# Altium footprint library FootPrintLib_12.PcbLib: 319 footprints (part 16 of 20)
Each footprint in its own frame and in the unit in brackets; x right, y up, seen from the top. Pads: shape width x height; smd on the part's side, far side on the other; paste and mask are expansions set on the pad; w line width, h text height; cw(c..) or ccw(c..) is an arc to the next point about the centre after c.
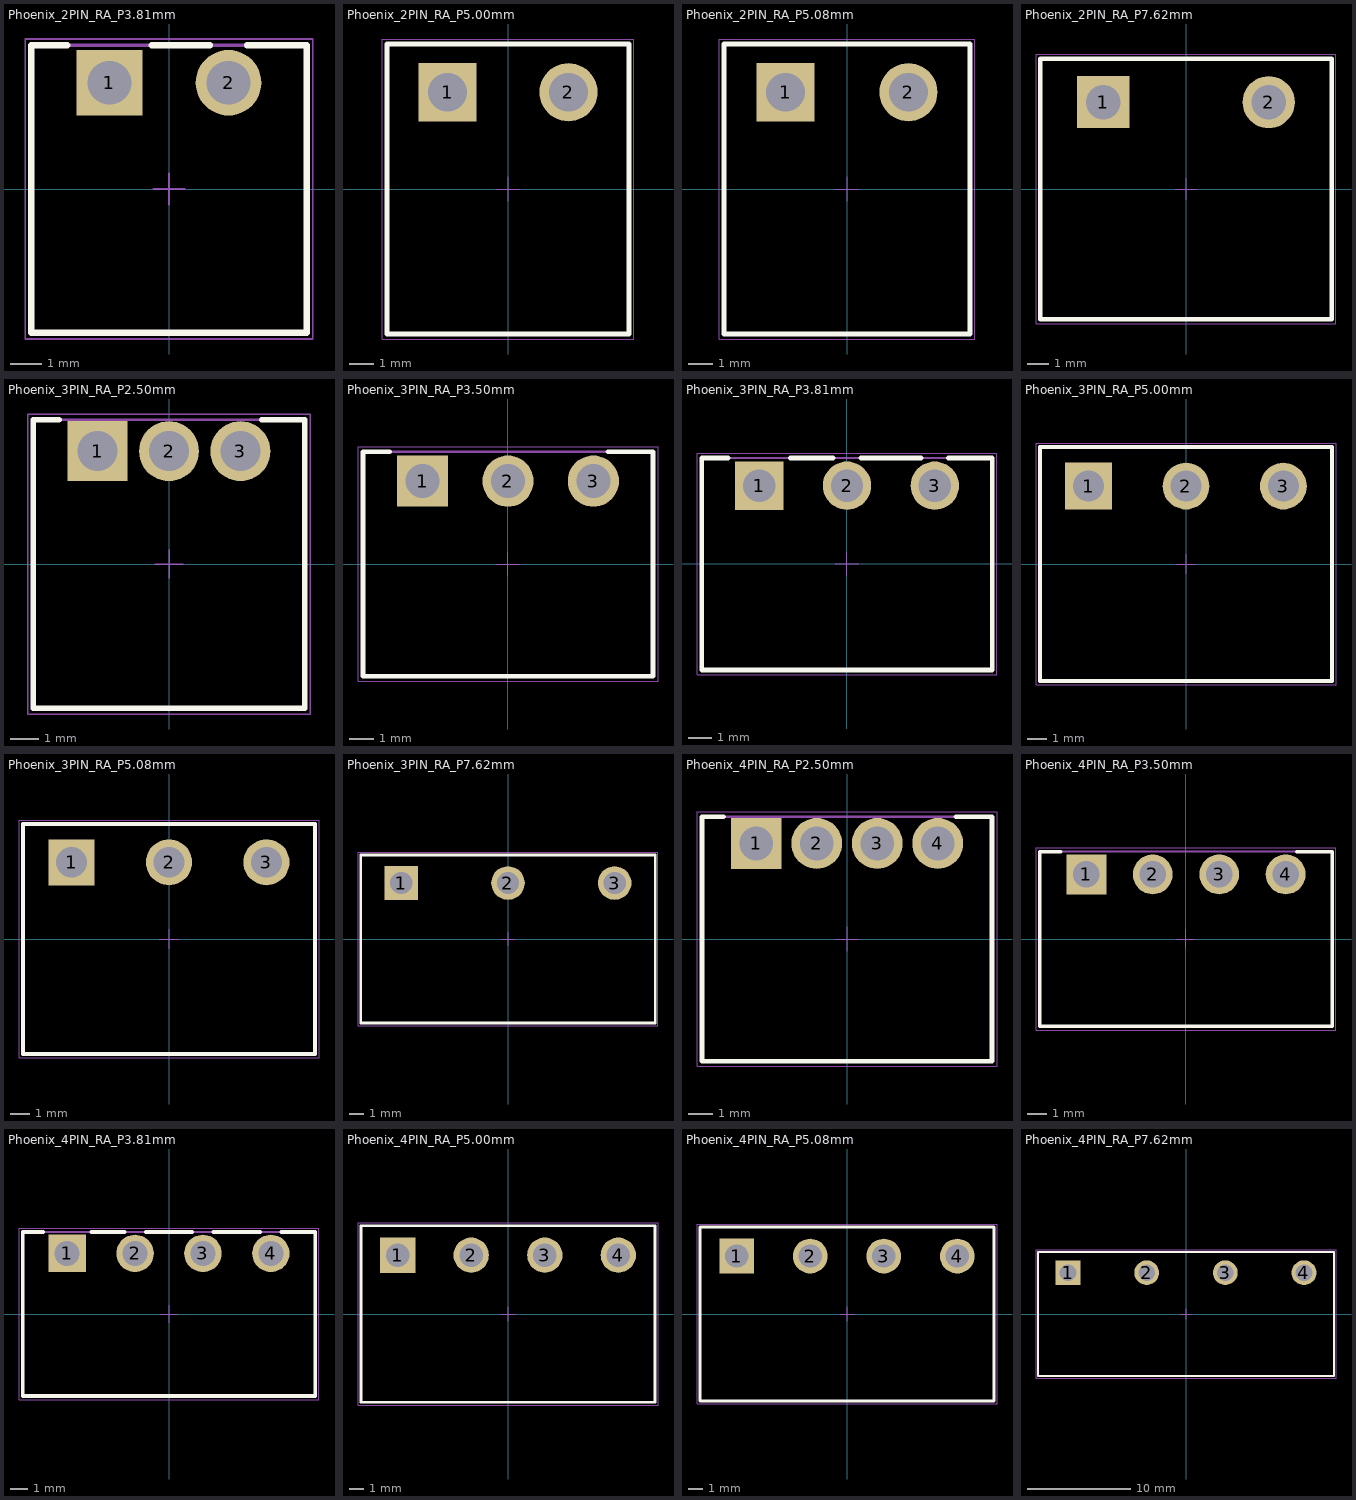
[diagram p15: the footprints below, top view; thin cyan lines are the x and y axes]

## Phoenix_2PIN_RA_P3.81mm [mm] "Phoenix 2 Pin; Pitch 3.81mm;"
height 7
pads (2):
  rect 2.1x2.1 hole 1.4: 1(-1.905,3.4)
  round 2.1 hole 1.4: 2(1.905,3.4)
Top Overlay:
  lines w0.2: -3.255,4.6 -4.405,4.6 -4.405,-4.6 4.405,-4.6 4.405,4.6 2.495,4.6 ; -0.555,4.6 1.315,4.6
Mechanical 13:
  lines w0.1: -4.405,-4.6 -4.405,4.6 4.405,4.6 4.405,-4.6 -4.405,-4.6
Mechanical 15:
  lines w0.05: -0.5,0 0.5,0 ; 0,-0.5 0,0.5 ; -4.605,-4.8 -4.605,4.8 4.605,4.8 4.605,-4.8 -4.605,-4.8
3D body "691322310002.stp": height 7.25, standoff -3.45, extent -4.405,-4.6 4.405,4.6

## Phoenix_2PIN_RA_P5.00mm [mm] "Phoenix 2 Pin; Pitch 5.08mm;"
height 8.5
pads (2):
  rect 2.4x2.4 hole 1.6: 1(-2.5,4)
  round 2.4 hole 1.6: 2(2.5,4)
Top Overlay:
  lines w0.2: -5,-6 5,-6 5,6 -5,6 -5,-6
Mechanical 13:
  lines w0.1: -5,-6 -5,6 5,6 5,-6 -5,-6
Mechanical 15:
  lines w0.05: -0.5,0 0.5,0 ; 0,-0.5 0,0.5 ; -5.2,-6.2 5.2,-6.2 5.2,6.2 -5.2,6.2 -5.2,-6.2
3D body "691312710002.stp": height 8.55, standoff -3.45, extent -5,-6 5,6

## Phoenix_2PIN_RA_P5.08mm [mm] "Phoenix 2 Pin; Pitch 5.08mm; Body 1016X1200"
height 8.5
pads (2):
  rect 2.4x2.4 hole 1.6: 1(-2.54,4)
  round 2.4 hole 1.6: 2(2.54,4)
Top Overlay:
  lines w0.2: -5.08,-6 5.08,-6 5.08,6 -5.08,6 -5.08,-6
Mechanical 13:
  lines w0.1: -5.08,-6 -5.08,6 5.08,6 5.08,-6 -5.08,-6
Mechanical 15:
  lines w0.05: -0.5,0 0.5,0 ; 0,-0.5 0,0.5 ; -5.28,-6.2 5.28,-6.2 5.28,6.2 -5.28,6.2 -5.28,-6.2
3D body "691312510002.stp": height 8.55, standoff -3.45, extent -5.08,-6 5.08,6

## Phoenix_2PIN_RA_P7.62mm [mm] "Phoenix 2 Pin; Pitch 7.62mm;"
height 8.5
pads (2):
  rect 2.4x2.4 hole 1.6: 1(-3.81,4)
  round 2.4 hole 1.6: 2(3.81,4)
Top Overlay:
  lines w0.2: -6.71,-6 6.71,-6 6.71,6 -6.71,6 -6.71,-6
Mechanical 13:
  lines w0.1: -6.71,-6 -6.71,6 6.71,6 6.71,-6 -6.71,-6
Mechanical 15:
  lines w0.05: -0.5,0 0.5,0 ; 0,-0.5 0,0.5 ; -6.91,-6.2 -6.91,6.2 6.91,6.2 6.91,-6.2 -6.91,-6.2
3D body "691312410002.stp": height 8.55, standoff -3.95, extent -6.71,-6 6.71,6

## Phoenix_3PIN_RA_P2.50mm [mm] "Phoenix 3 Pin; Pitch 2.50mm;"
height 8.1
pads (3):
  rect 2.1x2.1 hole 1.4: 1(-2.5,3.95)
  round 2.1 hole 1.4: 2(0,3.95) 3(2.5,3.95)
Top Overlay:
  lines w0.2: -3.85,5.05 -4.75,5.05 -4.75,-5.05 4.75,-5.05 4.75,5.05 3.25,5.05
Mechanical 13:
  lines w0.1: -4.75,-5.05 4.75,-5.05 4.75,5.05 -4.75,5.05 -4.75,-5.05
Mechanical 15:
  lines w0.05: -0.5,0 0.5,0 ; 0,-0.5 0,0.5 ; -4.95,-5.25 4.95,-5.25 4.95,5.25 -4.95,5.25 -4.95,-5.25
3D body "691382010003.stp": height 8.15, standoff -3.45, extent -4.75,-5.05 4.75,5.05

## Phoenix_3PIN_RA_P3.50mm [mm] "Phoenix 2 Pin; Pitch 3.50mm;"
height 7
pads (3):
  rect 2.1x2.1 hole 1.4: 1(-3.5,3.4)
  round 2.1 hole 1.4: 2(0,3.4) 3(3.5,3.4)
Top Overlay:
  lines w0.2: -4.85,4.6 -5.95,4.6 -5.95,-4.6 5.95,-4.6 5.95,4.6 4.1,4.6
Mechanical 13:
  lines w0.1: -5.95,-4.6 -5.95,4.6 5.95,4.6 5.95,-4.6 -5.95,-4.6
Mechanical 15:
  lines w0.05: -0.5,0 0.5,0 ; 0,-0.5 0,0.5 ; -6.15,-4.8 -6.15,4.8 6.15,4.8 6.15,-4.8 -6.15,-4.8
3D body "691322110003.stp": height 7.3, standoff -3.4, extent -5.95,-4.6 5.95,4.6

## Phoenix_3PIN_RA_P3.81mm [mm] "Phoenix 3 Pin; Pitch 3.81mm;"
height 7
pads (3):
  rect 2.1x2.1 hole 1.4: 1(-3.81,3.4)
  round 2.1 hole 1.4: 2(0,3.4) 3(3.81,3.4)
Top Overlay:
  lines w0.2: -5.16,4.6 -6.31,4.6 -6.31,-4.6 6.31,-4.6 6.31,4.6 4.4,4.6 ; -2.46,4.6 -0.59,4.6 ; 0.59,4.6 3.22,4.6
Mechanical 13:
  lines w0.1: -6.31,-4.6 6.31,-4.6 6.31,4.6 -6.31,4.6 -6.31,-4.6
Mechanical 15:
  lines w0.05: -0.5,0 0.5,0 ; 0,-0.5 0,0.5 ; -6.51,-4.8 6.51,-4.8 6.51,4.8 -6.51,4.8 -6.51,-4.8
3D body "691322310003.stp": height 7.25, standoff -3.45, extent -6.31,-4.6 6.31,4.6

## Phoenix_3PIN_RA_P5.00mm [mm] "Phoenix 3 Pin; Pitch 5.08mm;"
height 8.5
pads (3):
  rect 2.4x2.4 hole 1.6: 1(-5,4)
  round 2.4 hole 1.6: 2(0,4) 3(5,4)
Top Overlay:
  lines w0.2: -7.5,-6 7.5,-6 7.5,6 -7.5,6 -7.5,-6
Mechanical 13:
  lines w0.1: -7.5,-6 -7.5,6 7.5,6 7.5,-6 -7.5,-6
Mechanical 15:
  lines w0.05: -0.5,0 0.5,0 ; 0,-0.5 0,0.5 ; -7.7,-6.2 7.7,-6.2 7.7,6.2 -7.7,6.2 -7.7,-6.2
3D body "691312710003.stp": height 8.55, standoff -3.45, extent -7.5,-6 7.5,6

## Phoenix_3PIN_RA_P5.08mm [mm] "Phoenix 3 Pin; Pitch 5.08mm; Body 1524X1200"
height 8.5
pads (3):
  rect 2.4x2.4 hole 1.6: 1(-5.08,4)
  round 2.4 hole 1.6: 2(0,4) 3(5.08,4)
Top Overlay:
  lines w0.2: -7.62,-6 -7.62,6 7.62,6 7.62,-6 -7.62,-6
Mechanical 13:
  lines w0.1: -7.62,-6 7.62,-6 7.62,6 -7.62,6 -7.62,-6
Mechanical 15:
  lines w0.05: -0.5,0 0.5,0 ; 0,-0.5 0,0.5 ; -7.82,-6.2 -7.82,6.2 7.82,6.2 7.82,-6.2 -7.82,-6.2
3D body "691312510003.stp": height 8.55, standoff -3.45, extent -7.62,-6 7.62,6

## Phoenix_3PIN_RA_P7.62mm [mm] "Phoenix 3 Pin; Pitch 7.62mm;"
height 8.5
pads (3):
  rect 2.4x2.4 hole 1.6: 1(-7.62,4)
  round 2.4 hole 1.6: 2(0,4) 3(7.62,4)
Top Overlay:
  lines w0.2: -10.52,-6 10.52,-6 10.52,6 -10.52,6 -10.52,-6
Mechanical 13:
  lines w0.1: -10.52,-6 -10.52,6 10.52,6 10.52,-6 -10.52,-6
Mechanical 15:
  lines w0.05: -0.5,0 0.5,0 ; 0,-0.5 0,0.5 ; -10.72,-6.2 -10.72,6.2 10.72,6.2 10.72,-6.2 -10.72,-6.2
3D body "691312410003.stp": height 8.55, standoff -3.95, extent -10.52,-6 10.52,6

## Phoenix_4PIN_RA_P2.50mm [mm] "Phoenix 4 Pin; Pitch 2.50mm;"
height 8.1
pads (4):
  rect 2.1x2.1 hole 1.4: 1(-3.75,3.95)
  round 2.1 hole 1.4: 2(-1.25,3.95) 3(1.25,3.95) 4(3.75,3.95)
Top Overlay:
  lines w0.2: -5.1,5.05 -6,5.05 -6,-5.05 6,-5.05 6,5.05 4.5,5.05
Mechanical 13:
  lines w0.1: -6,-5.05 -6,5.05 6,5.05 6,-5.05 -6,-5.05
Mechanical 15:
  lines w0.05: -0.5,0 0.5,0 ; 0,-0.5 0,0.5 ; -6.2,-5.25 -6.2,5.25 6.2,5.25 6.2,-5.25 -6.2,-5.25
3D body "691382010004.stp": height 8.15, standoff -3.45, extent -6,-5.05 6,5.05

## Phoenix_4PIN_RA_P3.50mm [mm] "Phoenix 4 Pin; Pitch 3.50mm;"
height 7
pads (4):
  rect 2.1x2.1 hole 1.4: 1(-5.25,3.4)
  round 2.1 hole 1.4: 2(-1.75,3.4) 3(1.75,3.4) 4(5.25,3.4)
Top Overlay:
  lines w0.2: -6.6,4.6 -7.7,4.6 -7.7,-4.6 7.7,-4.6 7.7,4.6 5.85,4.6
Mechanical 13:
  lines w0.1: -7.7,-4.6 -7.7,4.6 7.7,4.6 7.7,-4.6 -7.7,-4.6
Mechanical 15:
  lines w0.05: -0.5,0 0.5,0 ; 0,-0.5 0,0.5 ; -7.9,-4.8 -7.9,4.8 7.9,4.8 7.9,-4.8 -7.9,-4.8
3D body "691322110004.stp": height 7.3, standoff -3.4, extent -7.7,-4.6 7.7,4.6

## Phoenix_4PIN_RA_P3.81mm [mm] "Phoenix 4 Pin; Pitch 3.81mm;"
height 7
pads (4):
  rect 2.1x2.1 hole 1.4: 1(-5.715,3.4)
  round 2.1 hole 1.4: 2(-1.905,3.4) 3(1.905,3.4) 4(5.715,3.4)
Top Overlay:
  lines w0.2: -7.065,4.6 -8.215,4.6 -8.215,-4.6 8.215,-4.6 8.215,4.6 6.305,4.6 ; -4.365,4.6 -2.495,4.6 ; -1.315,4.6 1.315,4.6 ; 2.495,4.6 5.125,4.6
Mechanical 13:
  lines w0.1: -8.215,-4.6 8.215,-4.6 8.215,4.6 -8.215,4.6 -8.215,-4.6
Mechanical 15:
  lines w0.05: -0.5,0 0.5,0 ; 0,-0.5 0,0.5 ; -8.415,-4.8 8.415,-4.8 8.415,4.8 -8.415,4.8 -8.415,-4.8
3D body "691322310004.stp": height 7.25, standoff -3.45, extent -8.215,-4.6 8.215,4.6

## Phoenix_4PIN_RA_P5.00mm [mm] "Phoenix 4 Pin; Pitch 5.08mm;"
height 8.5
pads (4):
  rect 2.4x2.4 hole 1.6: 1(-7.5,4)
  round 2.4 hole 1.6: 2(-2.5,4) 3(2.5,4) 4(7.5,4)
Top Overlay:
  lines w0.2: -10,-6 -10,6 10,6 10,-6 -10,-6
Mechanical 13:
  lines w0.1: -10,-6 10,-6 10,6 -10,6 -10,-6
Mechanical 15:
  lines w0.05: -0.5,0 0.5,0 ; 0,-0.5 0,0.5 ; -10.2,-6.2 -10.2,6.2 10.2,6.2 10.2,-6.2 -10.2,-6.2
3D body "691312710004.stp": height 8.55, standoff -3.45, extent -10,-6 10,6

## Phoenix_4PIN_RA_P5.08mm [mm] "Phoenix 4 Pin; Pitch 5.08mm; Body 2032X1200"
height 8.5
pads (4):
  rect 2.4x2.4 hole 1.6: 1(-7.62,4)
  round 2.4 hole 1.6: 2(-2.54,4) 3(2.54,4) 4(7.62,4)
Top Overlay:
  lines w0.2: -10.16,-6 10.16,-6 10.16,6 -10.16,6 -10.16,-6
Mechanical 13:
  lines w0.1: -10.16,-6 -10.16,6 10.16,6 10.16,-6 -10.16,-6
Mechanical 15:
  lines w0.05: -0.5,0 0.5,0 ; 0,-0.5 0,0.5 ; -10.36,-6.2 10.36,-6.2 10.36,6.2 -10.36,6.2 -10.36,-6.2
3D body "691312510004.stp": height 8.55, standoff -3.45, extent -10.16,-6 10.16,6

## Phoenix_4PIN_RA_P7.62mm [mm] "Phoenix 4 Pin; Pitch 7.62mm;"
height 8.5
pads (4):
  rect 2.4x2.4 hole 1.6: 1(-11.43,4)
  round 2.4 hole 1.6: 2(-3.81,4) 3(3.81,4) 4(11.43,4)
Top Overlay:
  lines w0.2: -14.33,-6 -14.33,6 14.33,6 14.33,-6 -14.33,-6
Mechanical 13:
  lines w0.1: -14.33,-6 14.33,-6 14.33,6 -14.33,6 -14.33,-6
Mechanical 15:
  lines w0.05: -0.5,0 0.5,0 ; 0,-0.5 0,0.5 ; -14.53,-6.2 14.53,-6.2 14.53,6.2 -14.53,6.2 -14.53,-6.2
3D body "691312410004.stp": height 8.55, standoff -3.95, extent -14.33,-6 14.33,6